# Altium schematic symbol library bno-055-schematic.SchLib: 1 symbol
Pins are listed as number, name and electrical type; pins without a type are passive.

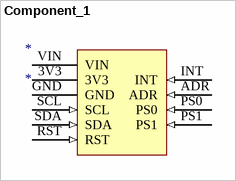
[diagram p0: symbol Component_1]

## Component_1
designator *
footprint PCBComponent_1
pins: 3V3 (power), ADR (in), GND (power), INT (in), PS0 (in), PS1 (in), RST (in), SCL (in), SDA (in), VIN (power)